# Altium footprint library PcbLib1.PcbLib: 1 footprints
Each footprint in its own frame and in the unit in brackets; x right, y up, seen from the top. Pads: shape width x height; smd on the part's side, far side on the other; paste and mask are expansions set on the pad; w line width, h text height; cw(c..) or ccw(c..) is an arc to the next point about the centre after c.
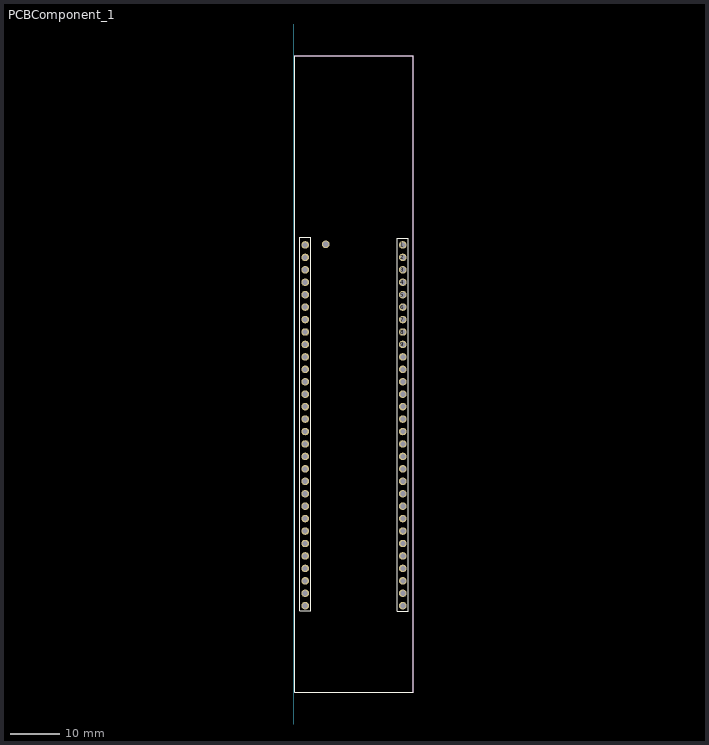
[diagram p0: the footprint, top view; thin cyan lines are the x and y axes]

## PCBComponent_1 [mil]
pads (61):
  oval 62.01x60 hole 41.34: 1(875,4395) 2(875,4295) 3(875,4195) 4(875,4095) 5(875,3995) 6(875,3895) 7(875,3795) 8(875,3695) 9(875,3595) 10(875,3495) 11(875,3395) 12(875,3295) 13(875,3195) 14(875,3095) 15(875,2995) 16(875,2895) 17(875,2795) 18(875,2695) 19(875,2595) 20(875,2495) 21(875,2395) 22(875,2295) 23(875,2195) 24(875,2095) 25(875,1995) 26(875,1895) 27(875,1795) 28(875,1695) 29(875,1595) 30(875,1495) 31(90,4395) 32(90,4295) 33(90,4195) 34(90,4095) 35(90,3995) 36(90,3895) 37(90,3795) 38(90,3695) 39(90,3595) 40(90,3495) 41(90,3395) 42(90,3295) 43(90,3195) 44(90,3095) 45(90,2995) 46(90,2895) 47(90,2795) 48(90,2695) 49(90,2595) 50(90,2495) 51(90,2395) 52(90,2295) 53(90,2195) 54(90,2095) 55(90,1995) 56(90,1895) 57(90,1795) 58(90,1695) 59(90,1595) 60(90,1495) 61(255,4400)
Top Overlay:
  lines w10: 5,800 5,5915 960,5915 960,800 5,800 ; 45,1455 135,1455 135,4455 45,4455 45,1455 ; 830,1450 920,1450 920,4450 830,4450 830,1450
Mechanical 1:
  lines w10: 815,800 5,800 5,5085 5,5110 5,5915 960,5915 960,5110 960,800 ; 815,800 960,800 ; 815,800 960,800 ; 815,800 960,800